# Altium footprint library MP2338GTL-P.PcbLib: 3 footprints
Each footprint in its own frame and in the unit in brackets; x right, y up, seen from the top. Pads: shape width x height; smd on the part's side, far side on the other; paste and mask are expansions set on the pad; w line width, h text height; cw(c..) or ccw(c..) is an arc to the next point about the centre after c.
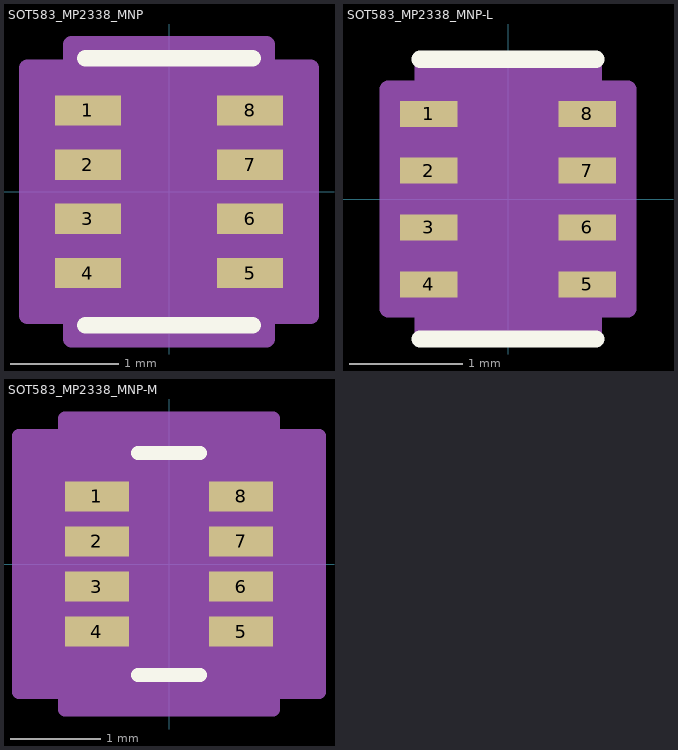
[diagram p0: the footprints below, top view; thin cyan lines are the x and y axes]

## SOT583_MP2338_MNP [mil]
pads (8):
  rect 24x11 smd paste+0 mask+0: 1(-29.5,29.53) 2(-29.5,9.84) 3(-29.5,-9.84) 4(-29.5,-29.53) 5(29.5,-29.53) 6(29.5,-9.84) 7(29.5,9.84) 8(29.5,29.53)
Top Overlay:
  lines w6: -30.5,-48.5 30.5,-48.5 ; -30.5,48.5 30.5,48.5
Mechanical 13:
  circle w1: c-17.5,29.53 r3
  lines w1: -12,43.5 ccw(c0,43.5) 12,43.5 ; -25.5,-43.5 -25.5,43.5 25.5,43.5 25.5,-43.5 -25.5,-43.5
Mechanical 15:
  region: 35.5,-53.5 -35.5,-53.5 -35.5,-45.03 -51.5,-45.03 -51.5,45.03 -35.5,45.03 -35.5,53.5 35.5,53.5 35.5,45.03 51.5,45.03 51.5,-45.03 35.5,-45.03
  lines w6: -51.5,-45.03 -51.5,45.03 -35.5,45.03 -35.5,53.5 35.5,53.5 35.5,45.03 51.5,45.03 51.5,-45.03 35.5,-45.03 35.5,-53.5 -35.5,-53.5 -35.5,-45.03 -51.5,-45.03
3D body "SOT583_MP2338_MNP.step": height 22.09, standoff 0, extent -33.5,-43.5 33.5,43.5

## SOT583_MP2338_MNP-L [mil]
pads (8):
  rect 20x9 smd paste+0 mask+0: 1(-27.5,29.53) 2(-27.5,9.84) 3(-27.5,-9.84) 4(-27.5,-29.53) 5(27.5,-29.53) 6(27.5,-9.84) 7(27.5,9.84) 8(27.5,29.53)
Top Overlay:
  lines w6: -30.5,-48.5 30.5,-48.5 ; -30.5,48.5 30.5,48.5
  text ".Designator" at -137.5,-25 h50
Mechanical 13:
  circle w1: c-17.5,29.53 r3
  lines w1: -12,43.5 ccw(c0,43.5) 12,43.5 ; -25.5,-43.5 25.5,-43.5 25.5,43.5 -25.5,43.5 -25.5,-43.5
  text ".Designator" at -137.5,-25 h50
Mechanical 15:
  region: 29.5,-47.5 -29.5,-47.5 -29.5,-38.03 -41.5,-38.03 -41.5,38.03 -29.5,38.03 -29.5,47.5 29.5,47.5 29.5,38.03 41.5,38.03 41.5,-38.03 29.5,-38.03
  lines w6: -41.5,-38.03 -29.5,-38.03 -29.5,-47.5 29.5,-47.5 29.5,-38.03 41.5,-38.03 41.5,38.03 29.5,38.03 29.5,47.5 -29.5,47.5 -29.5,38.03 -41.5,38.03 -41.5,-38.03
3D body "SOT583_MP2338_MNP.step": height 22.09, standoff 0, extent -33.5,-43.5 33.5,43.5

## SOT583_MP2338_MNP-M [mil]
pads (8):
  rect 28x13 smd paste+0 mask+0: 1(-31.5,29.53) 2(-31.5,9.84) 3(-31.5,-9.84) 4(-31.5,-29.53) 5(31.5,-29.53) 6(31.5,-9.84) 7(31.5,9.84) 8(31.5,29.53)
Top Overlay:
  lines w6: -13.49,-48.5 13.49,-48.5 ; -13.49,48.5 13.49,48.5
Mechanical 13:
  circle w1: c-17.5,29.53 r3
  lines w1: -12,43.5 ccw(c0,43.5) 12,43.5 ; -25.5,-43.5 25.5,-43.5 25.5,43.5 -25.5,43.5 -25.5,-43.5
Mechanical 15:
  region: 45.5,-63.5 -45.5,-63.5 -45.5,-56.03 -65.5,-56.03 -65.5,56.03 -45.5,56.03 -45.5,63.5 45.5,63.5 45.5,56.03 65.5,56.03 65.5,-56.03 45.5,-56.03
  lines w6: -65.5,-56.03 -45.5,-56.03 -45.5,-63.5 45.5,-63.5 45.5,-56.03 65.5,-56.03 65.5,56.03 45.5,56.03 45.5,63.5 -45.5,63.5 -45.5,56.03 -65.5,56.03 -65.5,-56.03
3D body "SOT583_MP2338_MNP.step": height 22.09, standoff 0, extent -33.5,-43.5 33.5,43.5